# Altium schematic symbol library Schlib1.SchLib: 15 symbols
Pins are listed as number, name and electrical type; pins without a type are passive.

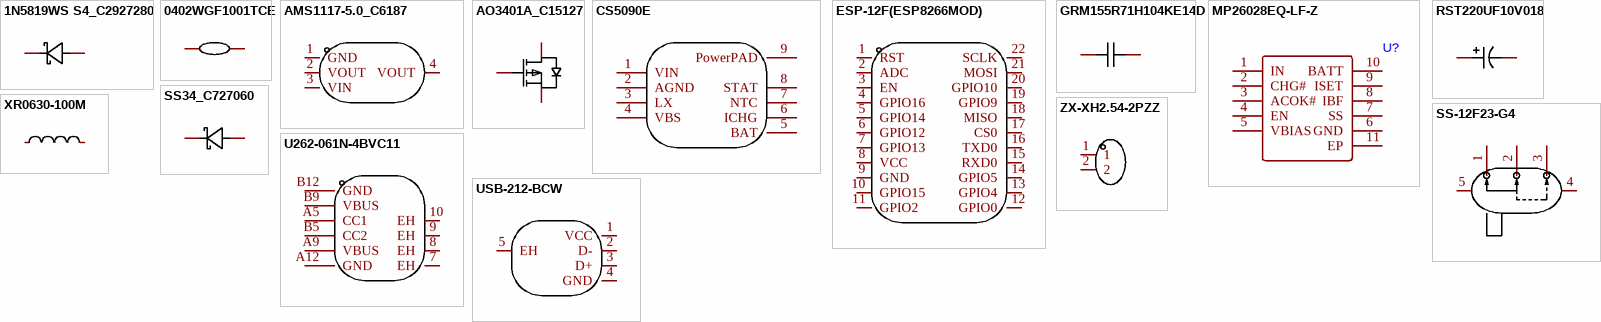
[diagram p0: symbols 1N5819WS S4_C2927280 to ZX-XH2.54-2PZZ]

## 1N5819WS S4_C2927280
designator D?  (value not drawn)
Manufacturer: JSMSEMI(杰盛微); Add into BOM: yes; Diode Configuration: 独立式; Forward Voltage (Vf@If): 600mV@200mA; Reverse Voltage (Vr): 40V; Average Rectified Current (Io): 350mA; Reverse Leakage Current (Ir): 5uA@30V; Symbol: 1N5819WS S4; Device: 1N5819WS S4_C2927280; LCSC Part Name: 电压:40V 电流:350mA; Supplier Part: C2927280; Manufacturer Part: 1N5819WS S4; Supplier Footprint: SOD-323; JLCPCB Part Class: Extended Part; Datasheet: https://atta.szlcsc.com/upload/public/pdf/source/20240105/574E572B69D2DF1CD36E5C05FAB269C4.pdf; Supplier: LCSC; Convert to PCB: yes
footprint SOD-323_L1.6-W1.3-LS2.7-RD
pins: 1 C, 2 A

## 0402WGF1001TCE
designator R?  (value not drawn)
Manufacturer: UNI-ROYAL(厚声); Value: 1kΩ; Add into BOM: yes; Tolerance: ±1%; Power(Watts): 62.5mW; Overload Voltage (Max): 50V; Temperature Coefficient: ±100ppm/℃; Symbol: 0402WGF1001TCE; Device: 0402WGF1001TCE; Supplier: LCSC; Manufacturer Part: 0402WGF1001TCE; Supplier Part: C11702; JLCPCB Part Class: Basic Part; LCSC Part Name: 1kΩ ±1% 62.5mW 厚膜电阻; Supplier Footprint: 0402; Datasheet: https://atta.szlcsc.com/upload/public/pdf/source/20200306/C422600_1E6D84923E4A46A82E41ADD87F860B5C.pdf; Convert to PCB: yes; Type: 厚膜电阻; Operating Temperature Range: -55℃~+155℃
footprint R0402
pins: 1, 2

## AMS1117-5.0_C6187
designator U?  (value not drawn)
Manufacturer: AMS; Add into BOM: yes; Output Type: 固定; Maximum Input Voltage: 12V; Output Voltage: 5V; MAX Output Current: 1A; Power Supply Rejection Ratio (PSRR): 68dB@(120Hz); Dropout Voltage: 1.3V@(1A); Output Polarity: 正极; Number of Outputs: 1; Symbol: AMS1117-5.0; Device: AMS1117-5.0_C6187; Supplier: LCSC; Manufacturer Part: AMS1117-5.0; Supplier Part: C6187; JLCPCB Part Class: Basic Part; LCSC Part Name: 输入12V 输出5V 1A; Supplier Footprint: SOT-223; Datasheet: https://atta.szlcsc.com/upload/public/pdf/source/20230918/E4B716057EE82179D88E8A0894830D59.pdf; Convert to PCB: yes; standby current: -; Noise: -; Feature: -; Operating Temperature: -
footprint SOT-223_L6.5-W3.5-P2.30-LS7.0-BR
pins: 1 GND, 2 VOUT, 3 VIN, 4 VOUT

## AO3401A_C15127
designator Q?  (value not drawn)
Manufacturer: AOS; Add into BOM: yes; Type: 1个P沟道; Drain Source Voltage (Vdss): 30V; Continuous Drain Current (Id): 4A; Power Dissipation (Pd): 1.4W; Drain Source On Resistance (RDS(on)@Vgs,Id): 44mΩ@10V,4.3A; Gate Threshold Voltage (Vgs(th)@Id): 1.3V@250uA; Total Gate Charge (Qg@Vgs): 12.2nC@4.5V; Input Capacitance (Ciss@Vds): 1.2nF@15V; Symbol: AO3401A; Device: AO3401A_C15127; LCSC Part Name: 1个P沟道 耐压:30V 电流:4A; Supplier Part: C15127; Manufacturer Part: AO3401A; Supplier Footprint: SOT-23; JLCPCB Part Class: Basic Part; Datasheet: https://atta.szlcsc.com/upload/public/pdf/source/20160507/1462613609053.pdf; Supplier: LCSC; Convert to PCB: yes; Operating Temperature: -55℃~+150℃@(Tj)
footprint SOT-23_L2.9-W1.3-P1.90-LS2.4-BR
pins: 1 G, 2 S, 3 D

## CS5090E
designator U?, comment TPS5430DDAR  (value not drawn)
Manufacturer: TI(德州仪器); Add into BOM: yes; Function: 降压型; Output Type: 可调; Input Voltage: 5.5V~36V; Output Voltage: 1.221V~32.04V; Output Current (Max): 3A; Switching Frequency: 500kHz; Synchronous Rectification: 否; Number of Outputs: 1; Topology: 降压式; Switch tube (built-in/external): 内置; Symbol: TPS5430DDAR; Device: TPS5430DDAR; LCSC Part Name: 降压 3A 36V; Supplier Part: C9864; Manufacturer Part: TPS5430DDAR; Supplier Footprint: SOIC-8-EP; JLCPCB Part Class: Basic Part; Datasheet: https://www.ti.com/cn/lit/gpn/tps5430; Supplier: LCSC; Convert to PCB: yes; Operating Temperature: -40℃~+125℃@(TJ)
footprint ESOP-8_L4.9-W3.9-P1.27-LS6.0-TL-EP
pins: 1 VIN, 2 AGND, 3 LX, 4 VBS, 5 BAT, 6 ICHG, 7 NTC, 8 STAT, 9 PowerPAD

## ESP-12F(ESP8266MOD)
designator U?  (value not drawn)
Manufacturer: Ai-Thinker(安信可); Add into BOM: yes; Core Processor: ESP8266芯片; Support Interface: GPIO；UART；I2C；PWM；SPI；ADC; Value: 2.4GHz; Antenna Type: 板载PCB天线; Output Power: 16dBm; Operating Voltage: 3.3V; Receive  Current: 120mA; Send  Current: 170mA; Sensitivity: -90dBm; Symbol: ESP-12F(ESP8266MOD); Device: ESP-12F(ESP8266MOD); LCSC Part Name: 完整的802.11b/g/nWi-FiSoC模块; Supplier Part: C82891; Manufacturer Part: ESP-12F(ESP8266MOD); Supplier Footprint: SMD,16x24mm; JLCPCB Part Class: Extended Part; Datasheet: https://atta.szlcsc.com/upload/public/pdf/source/20210219/C82891_ABD84A460F4F056A2757267CCCA4B508.pdf; Supplier: LCSC; Convert to PCB: yes; Wireless Standard: -; Operating Temperature: -40℃~+85℃
footprint WIFIM-SMD_ESP-12F-ESP8266MOD
pins: 1 RST, 2 ADC, 3 EN, 4 GPIO16, 5 GPIO14, 6 GPIO12, 7 GPIO13, 8 VCC, 9 GND, 10 GPIO15, 11 GPIO2, 12 GPIO0, 13 GPIO4, 14 GPIO5, 15 RXD0, 16 TXD0, 17 CS0, 18 MISO, 19 GPIO9, 20 GPIO10, 21 MOSI, 22 SCLK

## GRM155R71H104KE14D
designator C?  (value not drawn)
Manufacturer: muRata(村田); Value: 100nF; Add into BOM: yes; Tolerance: ±10%; Voltage Rated: 50V; Temperature Coefficient: X7R; Symbol: GRM155R71H104KE14D; Device: GRM155R71H104KE14D; Supplier: LCSC; Manufacturer Part: GRM155R71H104KE14D; Supplier Part: C77020; JLCPCB Part Class: Extended Part; LCSC Part Name: 100nF ±10% 50V; Supplier Footprint: 0402; Datasheet: https://atta.szlcsc.com/upload/public/pdf/source/20180326/C77020_39BD49C951FF1AF0DB1F1FAC5AC1E401.pdf; Convert to PCB: yes
footprint C0402
pins: 1, 2

## MP26028EQ-LF-Z
designator U?
footprint QFN-10_L3.0-W3.0-P0.50-LS3.0-BL-EP
pins: 1 IN, 2 CHG#, 3 ACOK#, 4 EN, 5 VBIAS, 6 GND, 7 SS, 8 IBF, 9 ISET, 10 BATT, 11 EP

## RST220UF10V018
designator C?  (value not drawn)
Manufacturer: KNSCHA(科尼盛); Add into BOM: yes; Value: 220uF; Tolerance: ±20%; Rated Voltage: 10V; Ripple Current: 85mA@120Hz; φD: 6.3mm; L: 5.4mm; Lifetime @ Temp: 2000hrs@105℃; Symbol: RST220UF10V018; Device: RST220UF10V018; LCSC Part Name: 220uF ±20% 10V; Supplier Part: C4747973; Manufacturer Part: RST220UF10V018; Supplier Footprint: SMD,D6.3xL5.4mm; JLCPCB Part Class: Extended Part; Datasheet: https://atta.szlcsc.com/upload/public/pdf/source/20220722/AD247F0826B90D1CD53BDFA96956336C.pdf; Supplier: LCSC; Convert to PCB: yes; Equivalent Series Resistance(ESR): -; Operating Temperature: -40℃~+105℃
footprint CAP-SMD_BD6.3-L6.6-W6.6-FD
pins: 1, 2

## SS34_C727060
designator D?  (value not drawn)
Manufacturer: TWGMC(台湾迪嘉); Manufacturer Part: SS34; Add into BOM: yes; Diode Configuration: 独立式; Forward Voltage (Vf@If): 550mV@3A; Reverse Voltage (Vr): 40V; Average Rectified Current (Io): 3A; Reverse Leakage Current (Ir): 500uA@40V; Symbol: SS34_C727060; Device: SS34_C727060; LCSC Part Name: 电压:40V 电流:3A; Supplier Part: C727060; Supplier Footprint: SMA(DO-214AC); JLCPCB Part Class: Extended Part; Datasheet: https://atta.szlcsc.com/upload/public/pdf/source/20200828/C727059_6599B6CAC5F3238B9C33E46794659DBE.pdf; Supplier: LCSC; Convert to PCB: yes
footprint SMA_L4.3-W2.5-LS5.0-RD
pins: 1 C, 2 A

## SS-12F23-G4
designator U?  (value not drawn)
Manufacturer: DEALON(德艺隆); Add into BOM: yes; Circuit: 单刀双掷; Actuator Style: 矩形柱状; Pin Style: PC引脚; Switch Length: 13mm; Switch Width: 5.8mm; Switch Height: 9mm; Actuator Color: 黑色; Symbol: SS-12F23-G4; Device: SS-12F23-G4; LCSC Part Name: 拨动开关; Supplier Part: C2998806; Manufacturer Part: SS-12F23-G4; Supplier Footprint: 插件; JLCPCB Part Class: Extended Part; Datasheet: https://atta.szlcsc.com/upload/public/pdf/source/20220428/B341684C4335C21BC408331FBC341DAE.pdf; Supplier: LCSC; Convert to PCB: yes; Mounting Style: 侧插; Mechanical Life: -
footprint SW-TH_SS-12F23-G040
pins: 1, 2, 3, 4, 5

## U262-061N-4BVC11
designator USB?  (value not drawn)
Manufacturer: XKB Connection(中国星坤); Add into BOM: yes; Connector Type: Type-C; Gender: 母; Number of Ports: 1; Number of Contacts: 6P; Current Rating - Power (Max): 5A; Soldering Temperature(Max): 260℃; Symbol: U262-061N-4BVC11; Device: U262-061N-4BVC11; LCSC Part Name: Type-C 母 卧贴; Supplier Part: C2764612; Manufacturer Part: U262-061N-4BVC11; Supplier Footprint: SMD; JLCPCB Part Class: Extended Part; Datasheet: https://atta.szlcsc.com/upload/public/pdf/source/20210602/C2764612_915BA3D27A0B76A9D989108E3A082B29.pdf; Supplier: LCSC; Convert to PCB: yes; Standard: USB 3.1; Mounting Style: 卧贴; Contact Material: 铜合金; Contact Plating: 金; Operating Temperature Range: -25℃~+85℃
footprint USB-SMD_U262-061N-4BVC11
pins: 7 EH, 8 EH, 9 EH, 10 EH, A5 CC1, A9 VBUS, A12 GND, B5 CC2, B9 VBUS, B12 GND

## USB-212-BCW
designator USB?  (value not drawn)
Manufacturer: XUNPU(讯普); Add into BOM: yes; Connector Type: Type-A; Gender: 公; Number of Ports: 1; Number of Contacts: 4P; Current Rating - Power (Max): 1.5A; Soldering Temperature(Max): 260℃; Symbol: USB-212-BCW; Device: USB-212-BCW; Supplier: LCSC; Supplier Part: C720521; Manufacturer Part: USB-212-BCW; JLCPCB Part Class: Extended Part; LCSC Part Name: Type-A 公 卧贴; Supplier Footprint: SMD; Datasheet: https://atta.szlcsc.com/upload/public/pdf/source/20200810/C720521_9B8BCB15430B8E438AE60E4D526760F3.pdf; Convert to PCB: yes; Standard: USB 2.0; Mounting Style: 卧贴; Operating Temperature Range: -20℃~+70℃
footprint USB-A-SMD_USB-212-BCW
pins: 1 VCC, 2 D-, 3 D+, 4 GND, 5 EH

## XR0630-100M
designator U?  (value not drawn)
Manufacturer: XR(祥如); Add into BOM: yes; Value: 10uH; Tolerance: ±20%; Rated Current: 4.5A; Saturation Current (Isat): 5.5A; DC Resistance (DCR): 68mΩ; Symbol: XR0630-100M; Device: XR0630-100M; LCSC Part Name: 10uH ±20% 5.5A; Supplier Part: C5307622; Manufacturer Part: XR0630-100M; Supplier Footprint: SMD,0630; JLCPCB Part Class: Extended Part; Datasheet: https://atta.szlcsc.com/upload/public/pdf/source/20240328/FF0C10B64CBAAE6FA647F96E85C1BA7B.pdf; Supplier: LCSC; Convert to PCB: yes; Type: 一体成型电感
footprint IND-SMD_L7.0-W6.6
pins: 1, 2

## ZX-XH2.54-2PZZ
designator CN?  (value not drawn)
Manufacturer: Megastar(兆星); Add into BOM: yes; Pins Structure: 1x2P; Pitch: 2.54mm; Reference Series: XH; Number of PINs Per Row: 2; Current Rating (Max): 3A; Symbol: ZX-XH2.54-2PZZ; Device: ZX-XH2.54-2PZZ; Supplier: LCSC; Supplier Part: C7429632; Manufacturer Part: ZX-XH2.54-2PZZ; JLCPCB Part Class: Extended Part; LCSC Part Name: ZX-XH2.54-2PZZ; Supplier Footprint: 插件,P=2.54mm; Datasheet: https://atta.szlcsc.com/upload/public/pdf/source/20230619/19BA6947230AA44A04D3EDD65E618FD0.pdf; Convert to PCB: yes; Mounting Style: 直插; Number of Pins: 2P; Number of Rows: 1; Row Spacing: -; Contact Material: 黄铜; Contact Plating: 锡; Operating Temperature Range: -25℃~+85℃
footprint CONN-TH_2P-P2.50_HX25003-2A
pins: 1, 2